# EAGLE library part WE-HCIM_100806 (library WE-HCIM)
WE-HCIM High-Current Molded Inductor for Multiphase Applications Characteristics Low inductance: <100 nH Low DC resistance of <0.3 mΩ High saturation current of 67–130 A High-frequency capability: self-resonant frequency up to 300 MHz Core material: iron alloy High efficiency for demanding, high-current applications Flexible design options: suitable for single, double, 2×2 matrix, and TLVR topologies Operating temperature up to 155 °C Applications Multiphase VRM for CPUs/GPUs/AI accelerators Data center servers and high-performance computing (HPC) platforms AI chip Power Delivery Networks (PDN) High Power ASIC applications Laptop/notebook power supplies Power modules for high-end semiconductor/chipset manufacturers 5 G PMUs due to its ability to operate at very high frequencies Details see: www.we-online.com/components/products/WE-HCIM Created by Ella 2026-10-20 2026 (C) Würth Elektronik
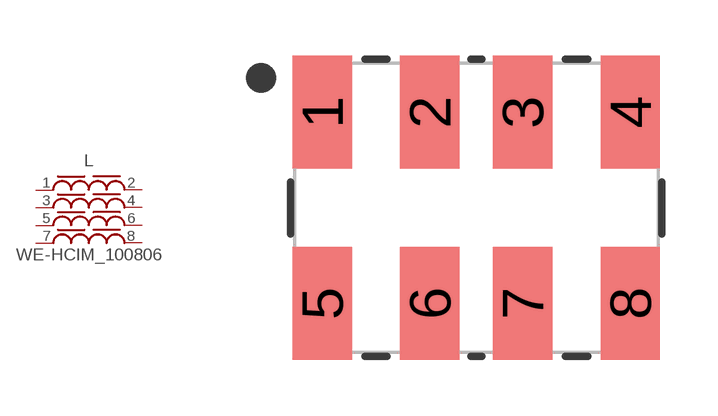
[diagram p0: symbol with the pads of WE-HCIM_100806; footprint WE-HCIM_100806]

Designator prefix L

## WE-HCIM_100806_74432100806030 (CATEGORY: Inductors; COUPLING-COEFFICIENT: 0.1; DATASHEET: https://www.we-online.com/redexpert/spec/74432100806030?ae; DC-RESISTANCE-TYP: 0.24mohm; HEIGHT: 5.8mm; INDUCTANCE: 30nH; LENGTH: 9.8mm; MANUFACTURER: Würth Elektronik; MOUNT: SMT; MPN: 74432100806030; OPERATING-VOLTAGE: 60V; PERFORMANCE-RATED-CURRENT: 32A@40K; SATURATION-CURRENT: 115A@30%; SELF-RESONANT-FREQUENCY: 442MHz; SIZE: 100806; VALUE: 30nH; WIDTH: 7.8mm), WE-HCIM_100806_74432100806085 (CATEGORY: Inductors; COUPLING-COEFFICIENT: 0.1; DATASHEET: https://www.we-online.com/redexpert/spec/74432100806085?ae; DC-RESISTANCE-TYP: 0.24mohm; HEIGHT: 5.8mm; INDUCTANCE: 85nH; LENGTH: 9.8mm; MANUFACTURER: Würth Elektronik; MOUNT: SMT; MPN: 74432100806085; OPERATING-VOLTAGE: 60V; PERFORMANCE-RATED-CURRENT: 32A@40K; SATURATION-CURRENT: 80A@30%; SELF-RESONANT-FREQUENCY: 252MHz; SIZE: 100806; VALUE: 85nH; WIDTH: 7.8mm)  [WE-HCIM_100806]
1  1  pas
2  2  pas
3  3  pas
4  4  pas
5  5  pas
6  6  pas
7  7  pas
8  8  pas

## Footprint WE-HCIM_100806 (pad centres in mm)
WE-HCIM High-Current Molded Inductor for Multiphase Applications Size: 100806 SMT, 2pins LXWXH=9.8mmX7.8mmX5.8mm
smd 1.6 x 3.05: 1 -4.15,2.575; 2 -1.25,2.575; 3 1.25,2.575; 4 4.15,2.575; 5 -4.15,-2.575; 6 -1.25,-2.575; 7 1.25,-2.575; 8 4.15,-2.575